# Altium footprint library 0805_Capacitor.PcbLib: 1 footprints
Each footprint in its own frame and in the unit in brackets; x right, y up, seen from the top. Pads: shape width x height; smd on the part's side, far side on the other; paste and mask are expansions set on the pad; w line width, h text height; cw(c..) or ccw(c..) is an arc to the next point about the centre after c.
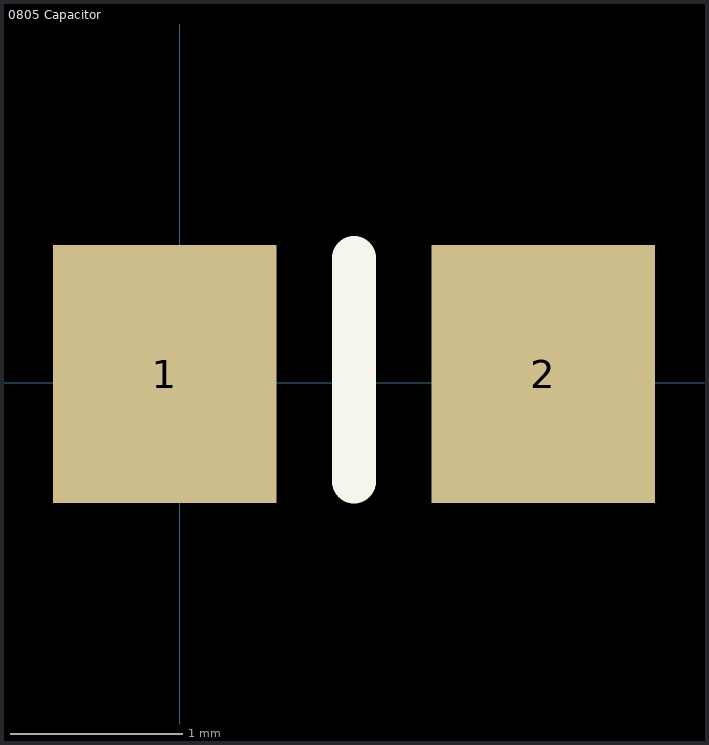
[diagram p0: the footprint, top view; thin cyan lines are the x and y axes]

## 0805 Capacitor [mm]
pads (2):
  rect 1.3x1.5 smd: 1(-0.088,0.051) 2(2.112,0.051)
Top Overlay:
  lines w0.254: 1.012,-0.574 1.012,0.726
3D body "User Library-0805(2012M) Cap.step": height 0.79, standoff 0, extent -0.229,-0.572 2.279,0.672